# Altium schematic symbol library HTSW-105-09-G-T.SchLib: 1 symbol
Pins are listed as number, name and electrical type; pins without a type are passive.

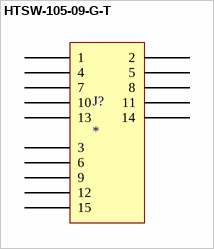
[diagram p0: symbol HTSW-105-09-G-T]

## HTSW-105-09-G-T
designator J?
15-Pin (3x5) Triple-Row Vertical Male Pin Header, 2.54mm Pitch, THT, Gold-Plated Contacts
footprint HTSW-105-09-G-T
pins: 1, 2, 3, 4, 5, 6, 7, 8, 9, 10, 11, 12, 13, 14, 15